# Altium footprint library NC7SZ05P5X.PcbLib: 3 footprints
Each footprint in its own frame and in the unit in brackets; x right, y up, seen from the top. Pads: shape width x height; smd on the part's side, far side on the other; paste and mask are expansions set on the pad; w line width, h text height; cw(c..) or ccw(c..) is an arc to the next point about the centre after c.
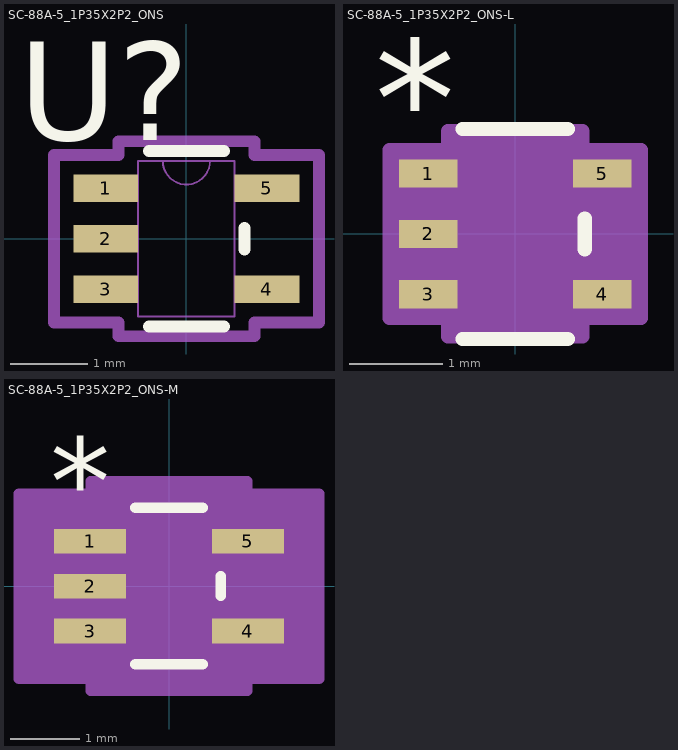
[diagram p0: the footprints below, top view; thin cyan lines are the x and y axes]

## SC-88A-5_1P35X2P2_ONS [mil]
pads (5):
  rect 32.81x14 smd paste+0 mask+0: 1(-40.9,25.59) 2(-40.9,0) 3(-40.9,-25.59) 4(40.9,-25.59) 5(40.9,25.59)
Top Overlay:
  lines w6: -19.04,-44.5 19.04,-44.5 ; -19.04,44.5 19.04,44.5 ; 29.5,-5.49 29.5,5.49
  text "U?" at -85,50 h50
Mechanical 13:
  lines w1: -12,39.5 ccw(c0,39.5) 12,39.5 ; -43.31,-31.59 -24.5,-31.59 -24.5,-19.59 -43.31,-19.59 -43.31,-31.59 ; -43.31,-6 -24.5,-6 -24.5,6 -43.31,6 -43.31,-6 ; -43.31,19.59 -24.5,19.59 -24.5,31.59 -43.31,31.59 -43.31,19.59 ; -24.5,-39.5 -24.5,39.5 24.5,39.5 24.5,-39.5 -24.5,-39.5 ; 24.5,-31.59 43.31,-31.59 43.31,-19.59 24.5,-19.59 24.5,-31.59 ; 24.5,19.59 43.31,19.59 43.31,31.59 24.5,31.59 24.5,19.59
Mechanical 15:
  lines w6: -67.31,-42.59 -34.5,-42.59 -34.5,-49.5 34.5,-49.5 34.5,-42.59 67.31,-42.59 67.31,42.59 34.5,42.59 34.5,49.5 -34.5,49.5 -34.5,42.59 -67.31,42.59 -67.31,-42.59
3D body "SC-88A-5_1P35X2P2_ONS.step": height 43.11, standoff 0, extent -43.31,-39.49 43.31,39.49

## SC-88A-5_1P35X2P2_ONS-L [mil]
pads (5):
  rect 24.81x12 smd paste+0 mask+0: 1(-36.9,25.59) 2(-36.9,0) 3(-36.9,-25.59) 4(36.9,-25.59) 5(36.9,25.59)
Top Overlay:
  lines w6: -22.27,-44.5 22.27,-44.5 ; -22.27,44.5 22.27,44.5 ; 29.5,-6.49 29.5,6.49
  text ".Designator" at -137.5,-25 h50
  text "*" at -59.4,32.59 h50
Mechanical 13:
  lines w1: -12,39.5 ccw(c0,39.5) 12,39.5 ; -43.31,-31.59 -43.31,-19.59 -24.5,-19.59 -24.5,-31.59 -43.31,-31.59 ; -43.31,-6 -43.31,6 -24.5,6 -24.5,-6 -43.31,-6 ; -43.31,19.59 -43.31,31.59 -24.5,31.59 -24.5,19.59 -43.31,19.59 ; -24.5,-39.5 24.5,-39.5 24.5,39.5 -24.5,39.5 -24.5,-39.5 ; 24.5,-31.59 24.5,-19.59 43.31,-19.59 43.31,-31.59 24.5,-31.59 ; 24.5,19.59 24.5,31.59 43.31,31.59 43.31,19.59 24.5,19.59
  text "*" at -22,-13.5 h50
  text ".Designator" at -137.5,-25 h50
Mechanical 15:
  region: -28.5,-35.59 -53.31,-35.59 -53.31,35.59 -28.5,35.59 -28.5,43.5 28.5,43.5 28.5,35.59 53.31,35.59 53.31,-35.59 28.5,-35.59 28.5,-43.5 -28.5,-43.5
  lines w6: -53.31,-35.59 -53.31,35.59 -28.5,35.59 -28.5,43.5 28.5,43.5 28.5,35.59 53.31,35.59 53.31,-35.59 28.5,-35.59 28.5,-43.5 -28.5,-43.5 -28.5,-35.59 -53.31,-35.59
3D body "SC-88A-5_1P35X2P2_ONS.step": height 43.11, standoff 0, extent -43.31,-39.49 43.31,39.49

## SC-88A-5_1P35X2P2_ONS-M [mil]
pads (5):
  rect 40.81x14 smd paste+0 mask+0: 1(-44.9,25.59) 2(-44.9,0) 3(-44.9,-25.59) 4(44.9,-25.59) 5(44.9,25.59)
Top Overlay:
  lines w6: -19.04,-44.5 19.04,-44.5 ; -19.04,44.5 19.04,44.5 ; 29.5,-5.49 29.5,5.49
  text ".Designator" at -137.5,-25 h50
  text "*" at -67.4,34.59 h50
Mechanical 13:
  lines w1: -12,39.5 ccw(c0,39.5) 12,39.5 ; -43.31,-31.59 -43.31,-19.59 -24.5,-19.59 -24.5,-31.59 -43.31,-31.59 ; -43.31,-6 -43.31,6 -24.5,6 -24.5,-6 -43.31,-6 ; -43.31,19.59 -43.31,31.59 -24.5,31.59 -24.5,19.59 -43.31,19.59 ; -24.5,-39.5 24.5,-39.5 24.5,39.5 -24.5,39.5 -24.5,-39.5 ; 24.5,-31.59 24.5,-19.59 43.31,-19.59 43.31,-31.59 24.5,-31.59 ; 24.5,19.59 24.5,31.59 43.31,31.59 43.31,19.59 24.5,19.59
  text "*" at -22,-13.5 h50
  text ".Designator" at -137.5,-25 h50
Mechanical 15:
  region: -44.5,-52.59 -85.31,-52.59 -85.31,52.59 -44.5,52.59 -44.5,59.5 44.5,59.5 44.5,52.59 85.31,52.59 85.31,-52.59 44.5,-52.59 44.5,-59.5 -44.5,-59.5
  lines w6: -85.31,-52.59 -85.31,52.59 -44.5,52.59 -44.5,59.5 44.5,59.5 44.5,52.59 85.31,52.59 85.31,-52.59 44.5,-52.59 44.5,-59.5 -44.5,-59.5 -44.5,-52.59 -85.31,-52.59
3D body "SC-88A-5_1P35X2P2_ONS.step": height 43.11, standoff 0, extent -43.31,-39.49 43.31,39.49